# Altium schematic symbol library FDN338P.SchLib: 1 symbol
Pins are listed as number, name and electrical type; pins without a type are passive.

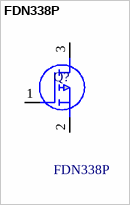
[diagram p0: symbol FDN338P]

## FDN338P
designator Q?
Fast switching speed; RDS(ON) = 155 m @ VGS = 2.5 V; RDS(ON)= 115 m @ VGS = 4.5 V ; SuperSOT -3 provides low RDS(ON) and 30% higherpower handling capability than SOT23 in the samefootprint; High performance trench technology for extremely low RDS(ON); 1.6 A, 20 V; Manufacturer_Name: onsemi; Geometry.Height: 1.12mm; Mouser Part Number: 512-FDN338P; Mouser Price/Stock: https://www.mouser.co.uk/ProductDetail/onsemi-Fairchild/FDN338P?qs=HK%252BeIG1iaag%252B6528k3ktAg%3D%3D; Manufacturer_Part_Number: FDN338P; Datasheet Link: https://www.onsemi.com/pub/Collateral/FDN338P-D.pdf
footprint SOT95P237X112-3N
pins: 1 G, 2 S, 3 D